# Altium footprint library RB1-105BAG1A.PcbLib: 1 footprints
Each footprint in its own frame and in the unit in brackets; x right, y up, seen from the top. Pads: shape width x height; smd on the part's side, far side on the other; paste and mask are expansions set on the pad; w line width, h text height; cw(c..) or ccw(c..) is an arc to the next point about the centre after c.
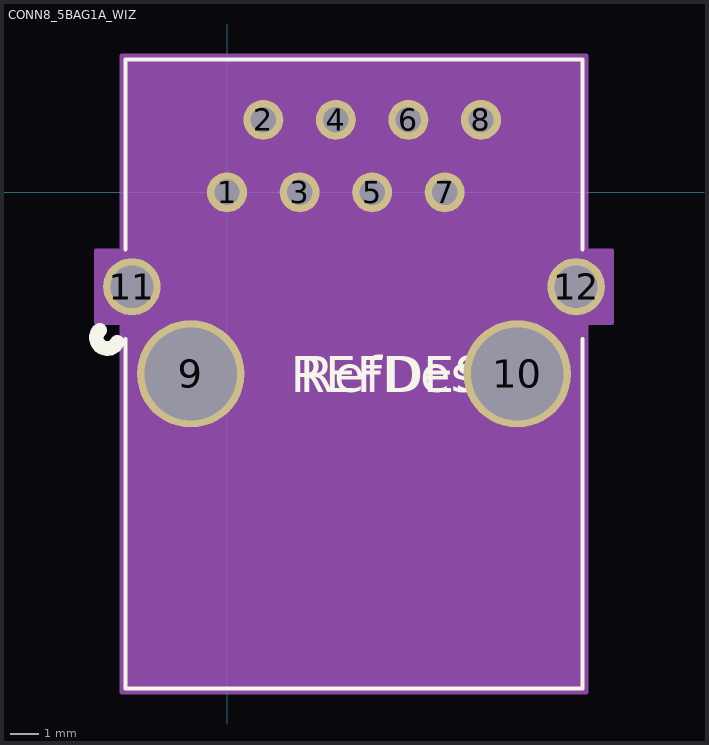
[diagram p0: the footprint, top view; thin cyan lines are the x and y axes]

## CONN8_5BAG1A_WIZ [mil]
pads (12):
  round 55 / inner round 60 / far side round 55 hole 35 paste-27.5 mask+0: 1(0,0) 2(50,100) 3(100,0) 4(150,100) 5(200,0) 6(250,100) 7(300,0) 8(350,100)
  round 148 / inner round 60 / far side round 148 hole 128 paste-74 mask-74: 9(-50,-250) 10(400,-250)
  round 79 / inner round 60 / far side round 79 hole 59 paste-39.5 mask-39.5: 11(-131.1,-129.92) 12(481.1,-129.92)
Top Overlay:
  lines w6: -140,-202.08 -140,-683.74 490,-683.74 490,-202.08 ; -140,-78.08 -140,183.26 490,183.26 490,-78.08
  lines w20: -175.72,-189.75 ccw(c-165,-200.24) -151.29,-206.31
  text "RefDes" at 100,-275.24 h50
  text "REFDES" at 87.5,-275.24 h50
Bottom Overlay:
  circle w20: c-165,-200.24 r15
Mechanical 13:
  circle w20: c25,-125.24 r15
  lines w1: -135,-678.74 485,-678.74 485,178.26 -135,178.26 -135,-678.74
  text "RefDes2" at 87.5,-275.24 h50
Mechanical 15:
  region: -145,-80.42 -180.6,-80.42 -180.6,-179.42 -145,-179.42 -145,-688.74 495,-688.74 495,-179.42 530.6,-179.42 530.6,-80.42 495,-80.42 495,188.26 -145,188.26
  lines w6: -180.6,-179.42 -180.6,-80.42 -145,-80.42 -145,188.26 495,188.26 495,-80.42 530.6,-80.42 530.6,-179.42 495,-179.42 495,-688.74 -145,-688.74 -145,-179.42 -180.6,-179.42